# Altium schematic symbol library flight_controller_schematic_lib.SchLib: 50 symbols
Pins are listed as number, name and electrical type; pins without a type are passive.

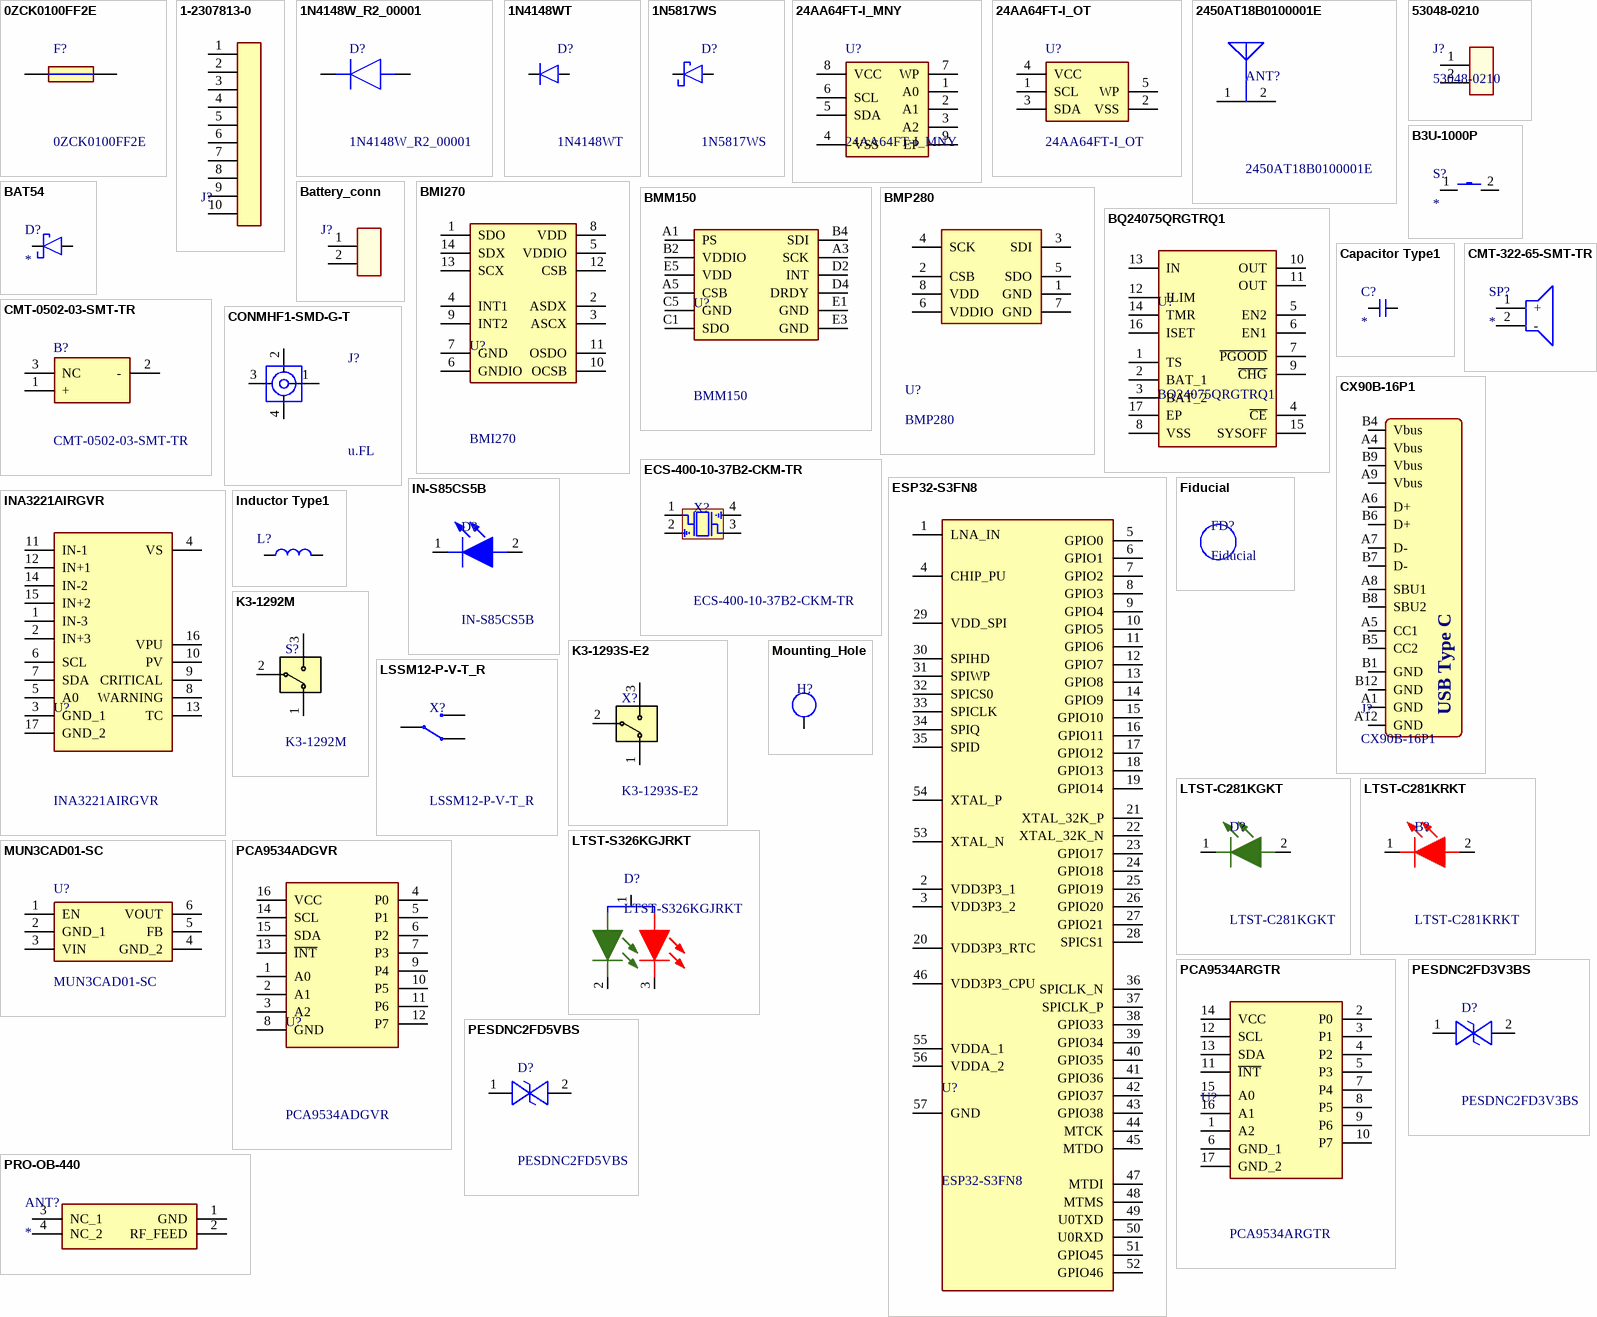
[diagram p0: symbols 0ZCK0100FF2E to PRO-OB-440]

## 0ZCK0100FF2E
designator F?
BEL FUSE - 0ZCK0100FF2E - FUSE, RESETTABLE PTC, 6VDC, 1A, SMD; Geometry.Height: 1.8mm; Mouser Part Number: 530-0ZCK0100FF2E; Mouser Price/Stock: https://www.mouser.co.uk/ProductDetail/Bel-Fuse/0ZCK0100FF2E?qs=SRYZG9HaIQ2v8oGuvbK2Ow%3D%3D; Manufacturer_Name: BelFuse; Manufacturer_Part_Number: 0ZCK0100FF2E; Datasheet Link: https://datasheet.datasheetarchive.com/originals/distributors/Datasheets_SAMA/1930bbf55c4e568fad6bff933d618f75.pdf
footprint FUSC2214X180N
pins: 1, 2

## 1-2307813-0
designator J?  (value not drawn)
Board to Board & Mezzanine Connectors 10P,2MM,BB,REC,SRVT,SMD,0.1AU,TR,W/CP
footprint 123078130 (10 Pos 2mm SMD connector)
pins: 1, 2, 3, 4, 5, 6, 7, 8, 9, 10

## 1N4148W_R2_00001
designator D?
Diodes - General Purpose, Power, Switching /A2/TR/13"/HF/10K/SOD-123/SWI/SOD/USM-04/USM04-QI01/PJ///; Manufacturer_Name: PANJIT; Geometry.Height: 1.35mm; Mouser Part Number: 241-1N4148W_R2_00001; Mouser Price/Stock: https://www.mouser.co.uk/ProductDetail/Panjit/1N4148W_R2_00001?qs=sPbYRqrBIVlsNrvmMQOkFA%3D%3D; Manufacturer_Part_Number: 1N4148W_R2_00001; Datasheet Link: *
footprint SOD3816X135N
pins: 1 K, 2 A

## 1N4148WT
designator D?
Fast Switching Diode (Trr < 4.0nsec) ; Moisture Level Sensitivity 1 ; Green Mold Compound; Matte Tin (Sn) Lead Finish ; Extremely Small Outline Plastic Package SOD523F ; Flat Lead, Surface Mount Device Under 0.70mm Height ; Pb-free Version and RoHS Compliant; Manufacturer_Name: onsemi; Geometry.Height: 0.7mm; Manufacturer_Part_Number: 1N4148WT; Mouser Part Number: 512-1N4148WT; Mouser Price/Stock: https://www.mouser.co.uk/ProductDetail/onsemi-Fairchild/1N4148WT?qs=2%2FYqgE%252BHg%252BJTXBWnIBbu3Q%3D%3D; Arrow Part Number: 1N4148WT; Arrow Price/Stock: https://www.arrow.com/en/products/1n4148wt/on-semiconductor?region=europe; Datasheet Link: https://www.onsemi.com/pub/Collateral/1N914BWT-D.pdf
footprint SODFL1608X70N
pins: 1 K, 2 A

## 1N5817WS
designator D?
Diode 20V 1A Surface Mount SOD-323; Manufacturer_Name: Guandong AK Semiconductor; Geometry.Height: 1.1mm; Manufacturer_Part_Number: 1N5817WS; Mouser Part Number: *; Mouser Price/Stock: *; Arrow Part Number: *; Arrow Price/Stock: *; Datasheet Link: https://atlas.eefcdn.com/partdatasheet/666677/666677_35638466_1757293714069.pdf
footprint SOD2613X110N
pins: 1 K, 2 A

## 24AA64FT-I_MNY
designator U?
EEPROM 64K 8KX8 1.8V SER EE IND 1/4AWP RPO; Manufacturer_Name: Microchip; Manufacturer_Part_Number: 24AA64FT-I/MNY; Geometry.Height: 0.8mm; Mouser Part Number: 579-24AA64FT-I/MNY; Mouser Price/Stock: https://www.mouser.co.uk/ProductDetail/Microchip-Technology/24AA64FT-I-MNY?qs=WqWCsLCZBkpYIYo7OoCm1g%3D%3D; Datasheet Link: http://www.microchip.com/mymicrochip/filehandler.aspx?ddocname=en541451
footprint SON50P300X200X80-9N-D
pins: 1 A0, 2 A1, 3 A2, 4 VSS, 5 SDA, 6 SCL, 7 WP, 8 VCC, 9 EP

## 24AA64FT-I_OT
designator U?
Microchip 24AA64FT-I/OT EEPROM Memory, 64kbit, 3500ns, 1.7  5.5 V 5-Pin SOT-23; Geometry.Height: 1.45mm; Mouser Part Number: 579-24AA64FT-I/OT; Mouser Price/Stock: https://www.mouser.co.uk/ProductDetail/Microchip-Technology/24AA64FT-I-OT?qs=WqWCsLCZBkrRsEB9Ux8Tvw%3D%3D; Manufacturer_Name: Microchip; Manufacturer_Part_Number: 24AA64FT-I/OT; Datasheet Link: http://ww1.microchip.com/downloads/en/DeviceDoc/21189T.pdf
footprint SOT95P270X145-5N
pins: 1 SCL, 2 VSS, 3 SDA, 4 VCC, 5 WP

## 2450AT18B0100001E
designator ANT?
RF ANTENNA Chip Solder Surface Mount ,2.4GHz ~ 2.5GHz ,2 W; Manufacturer_Name: JOHANSON TECHNOLOGY; Geometry.Height: 1.4mm; Mouser Part Number: *; Mouser Price/Stock: *; Manufacturer_Part_Number: 2450AT18B0100001E; Datasheet Link: https://www.johansontechnology.com/docs/3829/Antenna-2450AT18B0100001E-Rev5.0_uMmswfC.pdf
footprint ANTC3216X140N
pins: 1 FEED, 2 NC

## 53048-0210
designator J?
1.25mm Pitch, PicoBlade PCB Header, Single Row, Right-Angle, Surface Mount, Tin (Sn) Plating, Friction Lock, 2 Circuits, Natural, Tape and Reel; Manufacturer_Name: Molex Connector Corporation; Copyright: Copyright (C) 2025 Ultra Librarian. All rights reserved.; Manufacturer_Part_Number: 53048-0210; RefDes: RefDes; Type: Type
footprint 53048-0210 (Molex 2 pin 1.25mm pitch)
pins: 1, 2

## B3U-1000P
designator S?
Switch; Manufacturer_Name: OMRON Electronics; Manufacturer_Part_Number: B3U-1000P; Datasheet Link: https://www.omron.com/ecb/products/pdf/en-b3u.pdf; Mouser Part Number: 653-B3U-1000P; Mouser Price/Stock: https://www.mouser.co.uk/ProductDetail/Omron-Electronics/B3U-1000P?qs=AO7BQMcsEu4ip80xyf2FwA%3D%3D; Arrow Part Number: B3U-1000P; Arrow Price/Stock: https://www.arrow.com/en/products/b3u1000p/omron.html?utm_currency=USD&region=nac
footprint B3U-1000P
pins: 1, 2

## BAT54
designator D?
Schottky Diode with NC; Manufacturer_Name: Diotec; Manufacturer_Part_Number: BAT54; Datasheet Link: https://diotec.com/request/datasheet/bat54.pdf; Height: 1.2mm; Mouser Part Number: 637-BAT54; Mouser Price/Stock: https://www.mouser.co.uk/ProductDetail/Diotec-Semiconductor/BAT54?qs=OlC7AqGiEDly6dDY2EuTHA%3D%3D; Arrow Part Number: BAT54; Arrow Price/Stock: https://www.arrow.com/en/products/bat54/diotec-semiconductor-ag?utm_currency=USD&region=europe
footprint SOT95P237X112-3N
pins: 1 A, 3 K

## Battery_conn
designator J?, comment Battery  (value not drawn)
footprint Batt_pads
pins: 1, 2

## BMI270
designator U?
IMUs - Inertial Measurement Units Smart Ultra-Low Power Inertial Measurement Unit (IMU) for Wearable Applications; Manufacturer_Name: BOSCH; Geometry.Height: 0.87mm; Manufacturer_Part_Number: BMI270; Mouser Part Number: 262-BMI270; Mouser Price/Stock: https://www.mouser.co.uk/ProductDetail/Bosch-Sensortec/BMI270?qs=u16ybLDytRYIj%252BjQEee88A%3D%3D; Arrow Part Number: BMI270; Arrow Price/Stock: https://www.arrow.com/en/products/bmi270/bosch-sensortec?utm_currency=USD&region=europe; Datasheet Link: https://www.bosch-sensortec.com/media/boschsensortec/downloads/datasheets/bst-bmi270-ds000.pdf
footprint BMI270
pins: 1 SDO, 2 ASDX, 3 ASCX, 4 INT1, 5 VDDIO, 6 GNDIO, 7 GND, 8 VDD, 9 INT2, 10 OCSB, 11 OSDO, 12 CSB, 13 SCX, 14 SDX

## BMM150
designator U?
Board Mount Hall Effect / Magnetic Sensors 3-Axis 1.56x1.56mm WLCSP-12 Geomagnetic; Manufacturer_Name: BOSCH; Geometry.Height: 0.6mm; Manufacturer_Part_Number: BMM150; Mouser Part Number: 262-BMM150; Mouser Price/Stock: https://www.mouser.co.uk/ProductDetail/Bosch-Sensortec/BMM150?qs=d72FGnIDsgTOmKpCEe6mYw%3D%3D; Arrow Part Number: BMM150; Arrow Price/Stock: null?region=nac; Datasheet Link: https://www.arrow.com/en/products/bmm150/bosch
footprint BMM150
pins: A1 PS, A3 SCK, A5 CSB, B2 VDDIO, B4 SDI, C1 SDO, C5 GND, D2 INT, D4 DRDY, E1 GND, E3 GND, E5 VDD

## BMP280
designator U?
IC; SNSR; DIGITAL; BAROMETRIC PRESSURE SENSOR; LGA8; Manufacturer_Name: Bosch Sensortec; Copyright: Copyright (C) 2026 Ultra Librarian. All rights reserved.; Manufacturer_Part_Number: BMP280; RefDes: RefDes; Type: Type
footprint BMP280
pins: 1 GND, 2 CSB, 3 SDI, 4 SCK, 5 SDO, 6 VDDIO, 7 GND, 8 VDD

## BQ24075QRGTRQ1
designator U?
Automotive 4.35V to 16V, 1.5A Li-Ion Charger with Power-Path Management for 5.5V Systems; Manufacturer_Name: Texas Instruments; Geometry.Height: 1mm; Mouser Part Number: 595-BQ24075QRGTRQ1; Mouser Price/Stock: https://www.mouser.co.uk/ProductDetail/Texas-Instruments/BQ24075QRGTRQ1?qs=i8JZjLRTtkLLeOPMlhTMpg%3D%3D; Manufacturer_Part_Number: BQ24075QRGTRQ1; Datasheet Link: http://www.ti.com/lit/gpn/bq24075-q1
footprint QFN50P300X300X100-17N-D
pins: 1 TS, 2 BAT_1, 3 BAT_2, 4 ~{CE}, 5 EN2, 6 EN1, 7 ~{PGOOD}, 8 VSS, 9 ~{CHG}, 10 OUT, 11 OUT, 12 ILIM, 13 IN, 14 TMR, 15 SYSOFF, 16 ISET, 17 EP

## Capacitor Type1
designator C?
Value: *
pins: 1, 2

## CMT-322-65-SMT-TR
designator SP?
Loudspeaker or Buzzer; Manufacturer_Name: Same Sky; Manufacturer_Part_Number: CMT-322-65-SMT-TR; Datasheet Link: https://www.sameskydevices.com/product/resource/CMT-322-65-SMT-TR.pdf; Height: 2.5mm; Mouser Part Number: 490-CMT-322-65-SMTTR; Mouser Price/Stock: https://www.mouser.co.uk/ProductDetail/Same-Sky/CMT-322-65-SMT-TR?qs=pBJMDPsKWf2bBoY6kPbMAw%3D%3D; Arrow Part Number: CMT-322-65-SMT-TR; Arrow Price/Stock: https://www.arrow.com/en/products/cmt-322-65-smt-tr/cui-devices?utm_currency=USD&region=nac
footprint CMT32265SMTTR
pins: 1 +, 2 -

## CMT-0502-03-SMT-TR
designator B?
CMT-0502-03-SMT-TR - 5 mm, 3 Vo-p, 75 dB, Surface Mount, Magnetic Audio Transducer Buzzer; Manufacturer_Name: Same Sky; Geometry.Height: 2.3mm; Mouser Part Number: *; Mouser Price/Stock: *; Manufacturer_Part_Number: CMT-0502-03-SMT-TR; Datasheet Link: https://www.sameskydevices.com/product/resource/CMT-0502-03-SMT-TR.pdf
footprint CMT050203SMTTR
pins: 1 +, 2 -, 3 NC

## CONMHF1-SMD-G-T
designator J?, comment u.FL
Body Features: Body Material Copper Alloy; Manufacturer_Name: TE Connectivity; Manufacturer_Part_Number: CONMHF1-SMD-G-T; Geometry.Height: 1.31mm; Mouser Part Number: 712-CONMHF1-SMD-G-T; Mouser Price/Stock: https://www.mouser.co.uk/ProductDetail/TE-Connectivity-Linx-Technologies/CONMHF1-SMD-G-T?qs=7D1LtPJG0i0JqNJVGTgWfg%3D%3D; Datasheet Link: https://www.te.com/commerce/DocumentDelivery/DDEController?Action=srchrtrv&DocNm=conmhf1-smd-g-t-ds&DocType=Data%20Sheet&DocLang=English&PartCntxt=CONMHF1-SMD-G-T&DocFormat=pdf
footprint CONMHF1SMDGT
pins: 1 SIGNAL, 2 GND_1, 3 GND_1, 4 GND_1

## CX90B-16P1
designator J?
USB Connectors USB Type C, 2.0, 16P, Receptacle, Horizontal,Top Mount, Thru-Hole, T&R
footprint CX90B-16P1
pins: A1 GND, A4 Vbus, A5 CC1, A6 D+, A7 D-, A8 SBU1, A9 Vbus, A12 GND, B1 GND, B4 Vbus, B5 CC2, B6 D+, B7 D-, B8 SBU2, B9 Vbus, B12 GND
text: USB Type C

## ECS-400-10-37B2-CKM-TR
designator X?
40 MHz +/-10ppm Crystal 10pF 40 Ohms 4-SMD, No Lead , -20C ~ 70C; Manufacturer_Name: ECS; Geometry.Height: 0.5mm; Mouser Part Number: 520-400-10-37B2CKMTR; Mouser Price/Stock: https://www.mouser.co.uk/ProductDetail/ECS/ECS-400-10-37B2-CKM-TR?qs=QNEnbhJQKvYTTE6TC4Pr1w%3D%3D; Manufacturer_Part_Number: ECS-400-10-37B2-CKM-TR; Datasheet Link: https://ecsxtal.com/store/pdf/ECX-1637B2.pdf
footprint ECS4001037B2CKMTR
pins: 1 IN/OUT, 2 GND_1, 3 OUT/IN, 4 GND_2

## ESP32-S3FN8
designator U?
Espressif Systems [ENGINEERING SAMPLES]SMD IC , Dual-Core MCU, Wi-Fi 2.4G & BLE 5.0 combo, 8 MB Octal SPI PSRAM; Geometry.Height: 0.9mm; Manufacturer_Name: Espressif Systems; Manufacturer_Part_Number: ESP32-S3FN8; Mouser Part Number: 356-ESP32-S3FN8; Mouser Price/Stock: https://www.mouser.co.uk/ProductDetail/Espressif-Systems/ESP32-S3FN8?qs=Rp5uXu7WBW%2F4Oihh5tkiVQ%3D%3D; Arrow Part Number: *; Arrow Price/Stock: *; Datasheet Link: https://www.espressif.com/sites/default/files/documentation/esp32-s3_datasheet_en.pdf
footprint ESP32-S3FN8
pins: 1 LNA_IN, 2 VDD3P3_1, 3 VDD3P3_2, 4 CHIP_PU, 5 GPIO0, 6 GPIO1, 7 GPIO2, 8 GPIO3, 9 GPIO4, 10 GPIO5, 11 GPIO6, 12 GPIO7, 13 GPIO8, 14 GPIO9, 15 GPIO10, 16 GPIO11, 17 GPIO12, 18 GPIO13, 19 GPIO14, 20 VDD3P3_RTC, 21 XTAL_32K_P, 22 XTAL_32K_N, 23 GPIO17, 24 GPIO18, 25 GPIO19, 26 GPIO20, 27 GPIO21, 28 SPICS1, 29 VDD_SPI, 30 SPIHD, 31 SPIWP, 32 SPICS0, 33 SPICLK, 34 SPIQ, 35 SPID, 36 SPICLK_N, 37 SPICLK_P, 38 GPIO33, 39 GPIO34, 40 GPIO35, 41 GPIO36, 42 GPIO37, 43 GPIO38, 44 MTCK, 45 MTDO, 46 VDD3P3_CPU, 47 MTDI, 48 MTMS, 49 U0TXD, 50 U0RXD, 51 GPIO45, 52 GPIO46, 53 XTAL_N, 54 XTAL_P, 55 VDDA_1, 56 VDDA_2, 57 GND

## Fiducial
designator FD?
FID, 2mm  Fiducial; Value: Fiducial
footprint Fiducial 2mm

## IN-S85CS5B
designator D?
Standard LEDs - SMD Blue LED; Manufacturer_Name: Inolux; Geometry.Height: 0.7mm; Mouser Part Number: 743-IN-S85CS5B; Mouser Price/Stock: https://www.mouser.co.uk/ProductDetail/Inolux/IN-S85CS5B?qs=stqOd1AaK79rJ2RZKPoGSg%3D%3D; Manufacturer_Part_Number: IN-S85CS5B; Datasheet Link: https://www.inolux-corp.com/datasheet/SMDLED/Mono%20Color%20Side%20View/IN-S85CS5B_V1.0.pdf
footprint INS85CS5B
pins: 1 K, 2 A

## INA3221AIRGVR
designator U?
26V, Triple, Bi-Directional, Low-/High-Side, I2C Out Current/Voltage Monitor w/Alerts; Manufacturer_Name: Texas Instruments; Geometry.Height: 1mm; Manufacturer_Part_Number: INA3221AIRGVR; Mouser Part Number: 595-INA3221AIRGVR; Mouser Price/Stock: https://www.mouser.co.uk/ProductDetail/Texas-Instruments/INA3221AIRGVR?qs=3AcK5DacLboHys8907TVUQ%3D%3D; Arrow Part Number: INA3221AIRGVR; Arrow Price/Stock: https://www.arrow.com/en/products/ina3221airgvr/texas-instruments?utm_currency=USD&region=nac; Datasheet Link: http://www.ti.com/lit/ds/symlink/ina3221.pdf
footprint QFN65P400X400X100-17N-D
pins: 1 IN-3, 2 IN+3, 3 GND_1, 4 VS, 5 A0, 6 SCL, 7 SDA, 8 WARNING, 9 CRITICAL, 10 PV, 11 IN-1, 12 IN+1, 13 TC, 14 IN-2, 15 IN+2, 16 VPU, 17 GND_2

## Inductor Type1
designator L?  (value not drawn)
pins: 1, 2

## K3-1292M
designator S?
Toggle Switches 5*2.75mm RoHS; Manufacturer_Name: Korean Hroparts Elec; Geometry.Height: 1.4mm; Manufacturer_Part_Number: K3-1292M; Mouser Part Number: *; Mouser Price/Stock: *; Arrow Part Number: *; Arrow Price/Stock: *; Datasheet Link: https://datasheet.lcsc.com/szlcsc/Korean-Hroparts-Elec-K3-1293S-E2_C145852.pdf
footprint K3-1292M (1P2T ultra-small (surface-mount) toggle switch)
pins: 1, 2, 3

## K3-1293S-E2
designator X?
Toggle Switches 5*2.75mm RoHS; Manufacturer_Name: Korean Hroparts Elec; Geometry.Height: 1.4mm; Manufacturer_Part_Number: K3-1293S-E2; Mouser Part Number: *; Mouser Price/Stock: *; Arrow Part Number: *; Arrow Price/Stock: *; Datasheet Link: https://datasheet.lcsc.com/szlcsc/Korean-Hroparts-Elec-K3-1293S-E2_C145852.pdf
footprint K31293SE2
pins: 1, 2, 3

## LSSM12-P-V-T_R
designator X?
Slide Switches SLIDE SWITCH 1P2T WITH POST; Manufacturer_Name: Diptronics; Manufacturer_Part_Number: LSSM12-P-V-T/R; Geometry.Height: 3.5mm; Mouser Part Number: 113-LSSM12PVT/R; Mouser Price/Stock: https://www.mouser.co.uk/ProductDetail/Diptronics/LSSM12-P-V-T-R?qs=wnTfsH77Xs4YChp1btkL4g%3D%3D; Datasheet Link: https://www.mouser.ph/ProductDetail/Diptronics/LSSM12-P-V-T-R?qs=wnTfsH77Xs4YChp1btkL4g%3D%3D&srsltid=AfmBOooJxCwRHgjXlkODS0WomOPznMUqwPEDpvnL3DlYDgI8ZVr-fC2c
footprint LSSM12PVTR
pins: A1 NC, B1 COM, C1 NO

## LTST-C281KGKT
designator D?
Lite-On LTST-C281KGKT, LTST-C281 576.5 nm Green LED, 0402 Clear SMD package; Geometry.Height: 0.35mm; Mouser Part Number: 859-LTST-C281KGKT; Mouser Price/Stock: https://www.mouser.co.uk/ProductDetail/Lite-On/LTST-C281KGKT?qs=xb8aMrBSZRJ6%2FVAKgwiAkw%3D%3D; Manufacturer_Name: Lite-On; Manufacturer_Part_Number: LTST-C281KGKT; Datasheet Link: https://datasheet.lcsc.com/szlcsc/Lite-On-LTST-C281KGKT_C160479.pdf
footprint LTSTC281KRKT
pins: 1 K, 2 A

## LTST-C281KRKT
designator B?
Standard LEDs - SMD SMD LED Red 631nm 54mcd 130VA; Manufacturer_Name: Lite-On; Geometry.Height: 0.35mm; Mouser Part Number: 859-LTST-C281KRKT; Mouser Price/Stock: https://www.mouser.co.uk/ProductDetail/Lite-On/LTST-C281KRKT?qs=xb8aMrBSZRKAPWJcmf%2F7XQ%3D%3D; Manufacturer_Part_Number: LTST-C281KRKT; Datasheet Link: https://www.digikey.ph/en/products/detail/liteon/LTST-C281KRKT/3198723
footprint LTSTC281KRKT
pins: 1 K, 2 A

## LTST-S326KGJRKT
designator D?
Red / Green standard LED; Manufacturer_Name: Lite-On; Datasheet Link: http://optoelectronics.liteon.com/upload/download/DS22-2000-287/LTST-S326KGJRKT.pdf; Manufacturer_Part_Number: LTST-S326KGJRKT; Mouser Part Number: 859-LTST-S326KGJRKT; Mouser Price/Stock: https://www.mouser.co.uk/ProductDetail/Lite-On/LTST-S326KGJRKT?qs=sXYjIdLHthxXAK%252B5bY%252BGww%3D%3D; Arrow Part Number: LTST-S326KGJRKT; Arrow Price/Stock: https://www.arrow.com/en/products/ltst-s326kgjrkt/lite-on-technology.html?utm_currency=USD&region=nac
footprint LTST-S326KGJRKT
pins: 1 A, 2 K, 3 K

## Mounting_Hole
designator H?  (value not drawn)
footprint Plated_Hole (2.2mm diameter)
pins: 1

## MUN3CAD01-SC
designator U?
DC DC CONVERTER 0.8-4V; Manufacturer_Name: Delta Electronics; Geometry.Height: 1.05mm; Manufacturer_Part_Number: MUN3CAD01-SC; Mouser Part Number: 108-MUN3CAD01-SC; Mouser Price/Stock: https://www.mouser.co.uk/ProductDetail/Delta-Electronics/MUN3CAD01-SC?qs=t7xnP681wgVWBGFjFLJIqQ%3D%3D; Arrow Part Number: *; Arrow Price/Stock: *; Datasheet Link: https://www.cyntec.com/upfile/products/download/Cyntec%20MUN3CAD01-SC_Datasheet%2007.pdf
footprint MUN3CAD01SC
pins: 1 EN, 2 GND_1, 3 VIN, 4 GND_2, 5 FB, 6 VOUT

## PCA9534ADGVR
designator U?
Remote 8-Bit I2C and Low-Power I/O Expander With Interrupt Output and Configuration Registers; Manufacturer_Name: Texas Instruments; Geometry.Height: 1.2mm; Mouser Part Number: 595-PCA9534ADGVR; Mouser Price/Stock: https://www.mouser.co.uk/ProductDetail/Texas-Instruments/PCA9534ADGVR?qs=iSMark9AYDUsCEcRfoHXUA%3D%3D; Manufacturer_Part_Number: PCA9534ADGVR; Datasheet Link: http://www.ti.com/lit/gpn/pca9534a
footprint SOP40P640X120-16N
pins: 1 A0, 2 A1, 3 A2, 4 P0, 5 P1, 6 P2, 7 P3, 8 GND, 9 P4, 10 P5, 11 P6, 12 P7, 13 ~{INT}, 14 SCL, 15 SDA, 16 VCC

## PCA9534ARGTR
designator U?
Remote 8-Bit I2C and Low-Power I/O Expander With Interrupt Output and Configuration Registers; Manufacturer_Name: Texas Instruments; Geometry.Height: 1mm; Mouser Part Number: 595-PCA9534ARGTR; Mouser Price/Stock: https://www.mouser.co.uk/ProductDetail/Texas-Instruments/PCA9534ARGTR?qs=iSMark9AYDXZsmImREj9BA%3D%3D; Manufacturer_Part_Number: PCA9534ARGTR; Datasheet Link: http://www.ti.com/lit/ds/symlink/pca9534a.pdf
footprint QFN50P300X300X100-17N-D
pins: 1 A2, 2 P0, 3 P1, 4 P2, 5 P3, 6 GND_1, 7 P4, 8 P5, 9 P6, 10 P7, 11 ~{INT}, 12 SCL, 13 SDA, 14 VCC, 15 A0, 16 A1, 17 GND_2

## PESDNC2FD3V3BS
designator D?
Bottom ViewEM/CM/EMS Only; Manufacturer_Name: Prisemi; Geometry.Height: 0.498mm; Manufacturer_Part_Number: PESDNC2FD3V3BS; Mouser Part Number: *; Mouser Price/Stock: *; Arrow Part Number: *; Arrow Price/Stock: *; Datasheet Link: https://datasheet.lcsc.com/lcsc/2003172139_Shanghai-Prisemi-Elec-PESDNC2FD3V3BS_C496536.pdf
footprint PESDNC2FD3V3BS
pins: 1, 2

## PESDNC2FD5VBS
designator D?
Bi-directional 5V Normal Capacitance ESD Protector 5.6V , 5A , 12pF , 40W , -55~+150; Manufacturer_Name: Shanghai Prisemi Elec; Geometry.Height: 0.498mm; Manufacturer_Part_Number: PESDNC2FD5VBS; Mouser Part Number: *; Mouser Price/Stock: *; Arrow Part Number: *; Arrow Price/Stock: *; Datasheet Link: https://www.prisemi.com/pdf/7jdbhejgesd/PESDNC2FD5VBS.pdf
footprint PESDNC2FD5VBS
pins: 1, 2

## PRO-OB-440
designator ANT?
Antenna; Manufacturer_Name: ABRACON; Manufacturer_Part_Number: PRO-OB-440; Datasheet Link: https://abracon.com/datasheets/PRO-OB-440.pdf; Height: 3.53mm; Mouser Part Number: 815-PRO-OB-440; Mouser Price/Stock: https://www.mouser.co.uk/ProductDetail/ABRACON/PRO-OB-440?qs=TCDPyi3sCW1HMjuU5AeiSw%3D%3D; Arrow Part Number: PRO-OB-440; Arrow Price/Stock: https://www.arrow.com/en/products/pro-ob-440/abracon?utm_currency=USD&region=nac
footprint PROOB440
pins: 1 GND, 2 RF_FEED, 3 NC_1, 4 NC_2

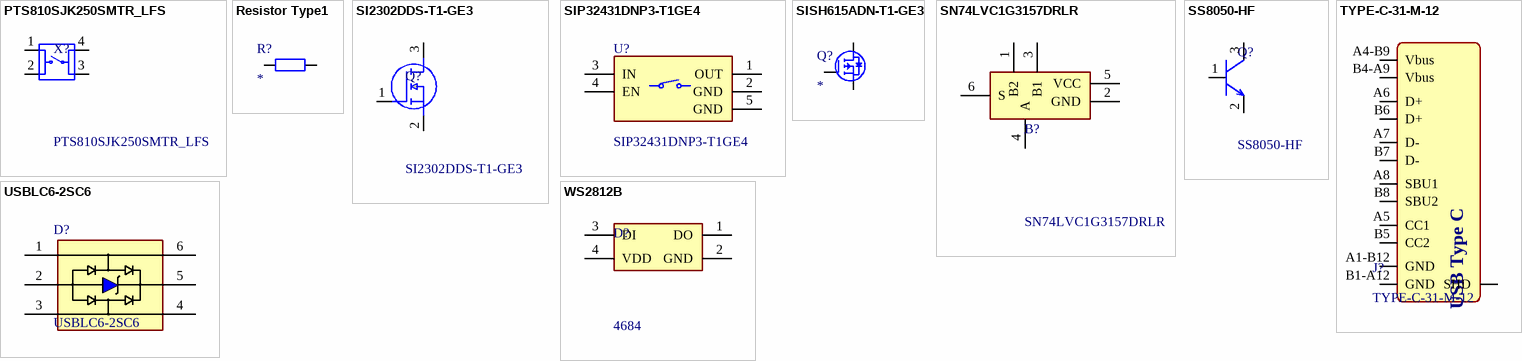
[diagram p1: symbols PTS810SJK250SMTR_LFS to WS2812B]

## PTS810SJK250SMTR_LFS
designator X?
TACTILE SWITCH, SPST, 0.05A, 16VDC, SMD; Manufacturer_Name: C & K COMPONENTS; Manufacturer_Part_Number: PTS810SJK250SMTR LFS; Geometry.Height: 2.7mm; Mouser Part Number: 611-PTS810SJK250SMTR; Mouser Price/Stock: https://www.mouser.co.uk/ProductDetail/CK/PTS810SJK250SMTR-LFS?qs=Imq1NPwxi77Ow0tzRIznfA%3D%3D; Datasheet Link: https://www.ckswitches.com/media/1476/pts810.pdf
footprint PTS810SJK250SMTRLFS
pins: 1 NO_1, 2 NO_2, 3 COM_1, 4 COM_2

## Resistor Type1
designator R?
Value: *
pins: 1, 2

## SI2302DDS-T1-GE3
designator Q?
SI2302DDS-T1-GE3 N-Channel MOSFET, 2.6 A, 20 V, 3-Pin SOT-363 Vishay; Geometry.Height: 1.12mm; Mouser Part Number: 78-SI2302DDS-T1-GE3; Mouser Price/Stock: https://www.mouser.co.uk/ProductDetail/Vishay-Semiconductors/SI2302DDS-T1-GE3?qs=MxnWX8BLHKdaCSNWhg%252BxLA%3D%3D; Manufacturer_Name: Vishay; Manufacturer_Part_Number: SI2302DDS-T1-GE3; Datasheet Link: http://www.vishay.com/docs/63653/si2302dds.pdf
footprint SOT95P237X112-3N
pins: 1 G, 2 S, 3 D

## SIP32431DNP3-T1GE4
designator U?
Power Switch ICs - Power Distribution 1A Slew Rate Ctrl Load Switch; Manufacturer_Name: Vishay; Geometry.Height: 0.6mm; Manufacturer_Part_Number: SIP32431DNP3-T1GE4; Mouser Part Number: 781-SIP32431DNP3-GE4; Mouser Price/Stock: https://www.mouser.co.uk/ProductDetail/Vishay-Semiconductors/SIP32431DNP3-T1GE4?qs=FfLXECYddQQ0YorCqBSrEw%3D%3D; Arrow Part Number: SIP32431DNP3-T1GE4; Arrow Price/Stock: https://www.arrow.com/en/products/sip32431dnp3-t1ge4/vishay?utm_currency=USD&region=nac; Datasheet Link: https://www.vishay.com/docs/66597/sip32431.pdf
footprint SON50P160X120X60-5N-D
pins: 1 OUT, 2 GND, 3 IN, 4 EN, 5 GND

## SISH615ADN-T1-GE3
designator Q?
MOSFET (P-Channel); Manufacturer_Name: Vishay; Manufacturer_Part_Number: SISH615ADN-T1-GE3; Datasheet Link: https://www.vishay.com/docs/79563/sish615adn.pdf; Height: 1.12mm; Mouser Part Number: 78-SISH615ADN-T1-GE3; Mouser Price/Stock: https://www.mouser.co.uk/ProductDetail/Vishay-Siliconix/SISH615ADN-T1-GE3?qs=byeeYqUIh0N%252B4TL1D9xeow%3D%3D; Arrow Part Number: SISH615ADN-T1-GE3; Arrow Price/Stock: https://www.arrow.com/en/products/sish615adn-t1-ge3/vishay
footprint SQS850ENT1_GE3
pins: 1,2,3 S, 4 G, 5,6,7,8,9,10,11 D

## SN74LVC1G3157DRLR
designator B?
Single-Pole, Double-Throw Analog Switch; Manufacturer_Name: Texas Instruments; Geometry.Height: 0.6mm; Mouser Part Number: 595-SN74LVC1G3157DRL; Mouser Price/Stock: https://www.mouser.co.uk/ProductDetail/Texas-Instruments/SN74LVC1G3157DRLR?qs=PVVDbbWpW3LmfSj83Os0NA%3D%3D; Manufacturer_Part_Number: SN74LVC1G3157DRLR; Datasheet Link: http://www.ti.com/lit/gpn/sn74lvc1g3157
footprint SOTFL50P160X60-6N
pins: 1 B2, 2 GND, 3 B1, 4 A, 5 VCC, 6 S

## SS8050-HF
designator Q?
Bipolar Transistors - BJT TRANS NPN 1.5A 40V SOT-23 R; Manufacturer_Name: Comchip Technology; Geometry.Height: 1.15mm; Mouser Part Number: 750-SS8050-HF; Mouser Price/Stock: https://www.mouser.co.uk/ProductDetail/Comchip-Technology/SS8050-HF?qs=T%252BzbugeAwjjubHjgf%252BCy6w%3D%3D; Manufacturer_Part_Number: SS8050-HF; Datasheet Link: *
footprint SOT95P240X115-3N
pins: 1 B, 2 E, 3 C

## TYPE-C-31-M-12
designator J?
Description; Manufacturer_Name: HRO Electronics; Copyright: Copyright (C) 2025 Ultra Librarian. All rights reserved.; Manufacturer_Part_Number: TYPE-C-31-M-12; RefDes: RefDes; Type: Type
footprint USB-C-31-M-12
pins: A1-B12 GND, A4-B9 Vbus, A5 CC1, A6 D+, A7 D-, A8 SBU1, B1-A12 GND, B4-A9 Vbus, B5 CC2, B6 D+, B7 D-, B8 SBU2, SHD
text: USB Type C

## USBLC6-2SC6
designator D?
TVS Diode Array Uni-Directional USBLC6-2SC6 17V, SOT-23 6-Pin; Manufacturer_Name: STMicroelectronics; Geometry.Height: 1.45mm; Mouser Part Number: 511-USBLC6-2SC6; Mouser Price/Stock: https://www.mouser.co.uk/ProductDetail/STMicroelectronics/USBLC6-2SC6?qs=po45yt2pPpu%2FhNIlwQdTlg%3D%3D; Manufacturer_Part_Number: USBLC6-2SC6; Datasheet Link: https://www.st.com/resource/en/datasheet/usblc6-2.pdf
footprint USBLC6-2 SOT-666
pins: 1 I/O1_1, 2 GND, 3 I/O2_1, 4 I/O2_2, 5 VBUS, 6 I/O1_2

## WS2812B
designator D?, comment 4684
Adafruit Accessories NeoPixel Nano 2020 RGB LEDs - 10-pack - WS2812B; Geometry.Height: 0.84mm; Mouser Part Number: 485-4684; Mouser Price/Stock: https://www.mouser.co.uk/ProductDetail/Adafruit/4684?qs=DPoM0jnrROWIv9%2FMCIm5vw%3D%3D; Manufacturer_Name: Adafruit; Manufacturer_Part_Number: 4684; Datasheet Link: https://cdn-shop.adafruit.com/product-files/4684/4684_WS2812B-2020_V1.3_EN.pdf
footprint 4684
pins: 1 DO, 2 GND, 3 DI, 4 VDD